# Altium schematic symbol library PJ1-021-SMT-TR.SchLib: 1 symbol
Pins are listed as number, name and electrical type; pins without a type are passive.

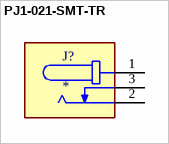
[diagram p0: symbol PJ1-021-SMT-TR]

## PJ1-021-SMT-TR
designator J?
1.65 x 5.15 mm, 5.0 A, Horizontal, Surface Mount (SMT), Dc Power Jack Connector; MF: Same Sky; MP: PJ1-021-SMT-TR; SnapEDA_Link: https://www.snapeda.com/parts/PJ1-021-SMT-TR/Same+Sky/view-part/?ref=snap; Package: None; Value: *; Check_prices: https://www.snapeda.com/parts/PJ1-021-SMT-TR/Same+Sky/view-part/?ref=eda
footprint CUI_PJ1-021-SMT-TR
pins: 1, 2, 3